# Altium footprint library SQJQ466ET1_GE3.PcbLib: 1 footprints
Each footprint in its own frame and in the unit in brackets; x right, y up, seen from the top. Pads: shape width x height; smd on the part's side, far side on the other; paste and mask are expansions set on the pad; w line width, h text height; cw(c..) or ccw(c..) is an arc to the next point about the centre after c.
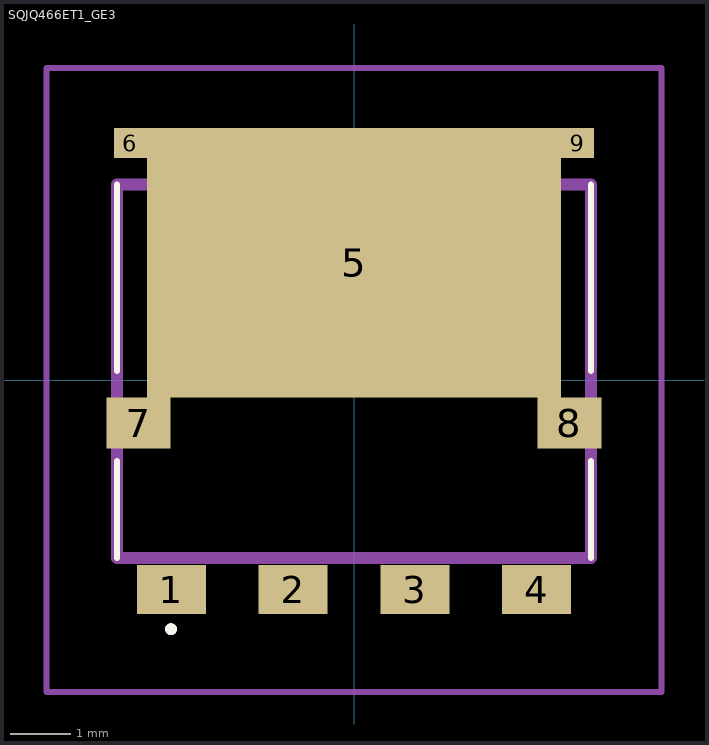
[diagram p0: the footprint, top view; thin cyan lines are the x and y axes]

## SQJQ466ET1_GE3 [mm]
pads (9):
  rect 1.15x0.82 smd: 1(-3.045,-3.49) 2(-1.015,-3.49) 3(1.015,-3.49) 4(3.045,-3.49)
  rect 6.9x4.49 smd: 5(0,1.955)
  rect 0.55x0.5 smd: 6(-3.725,3.95) 9(3.725,3.95)
  rect 1.07x0.85 smd: 7(-3.59,-0.715) 8(3.59,-0.715)
Top Overlay:
  lines w0.1: -3.95,-2.96 -3.95,-1.35 ; -3.95,0.15 -3.95,3.26 ; 3.95,-2.96 3.95,-1.35 ; 3.95,0.15 3.95,3.26 ; -3.1,-4.15 -3.1,-4.15 ; -3.1,-4.15 ccw(c-3.05,-4.15) -3,-4.15 ; -3.1,-4.15 cw(c-3.05,-4.15) -3,-4.15 ; -3,-4.15 -3,-4.15
Mechanical 15:
  lines w0.2: -3.95,-2.96 3.95,-2.96 3.95,3.26 -3.95,3.26 -3.95,-2.96
Mechanical 20:
  lines w0.1: -5.125,-5.2 5.125,-5.2 5.125,5.2 -5.125,5.2 -5.125,-5.2